# Altium integrated library crystal.IntLib: 105 symbols
Pins are listed as number, name and electrical type; pins without a type are passive.

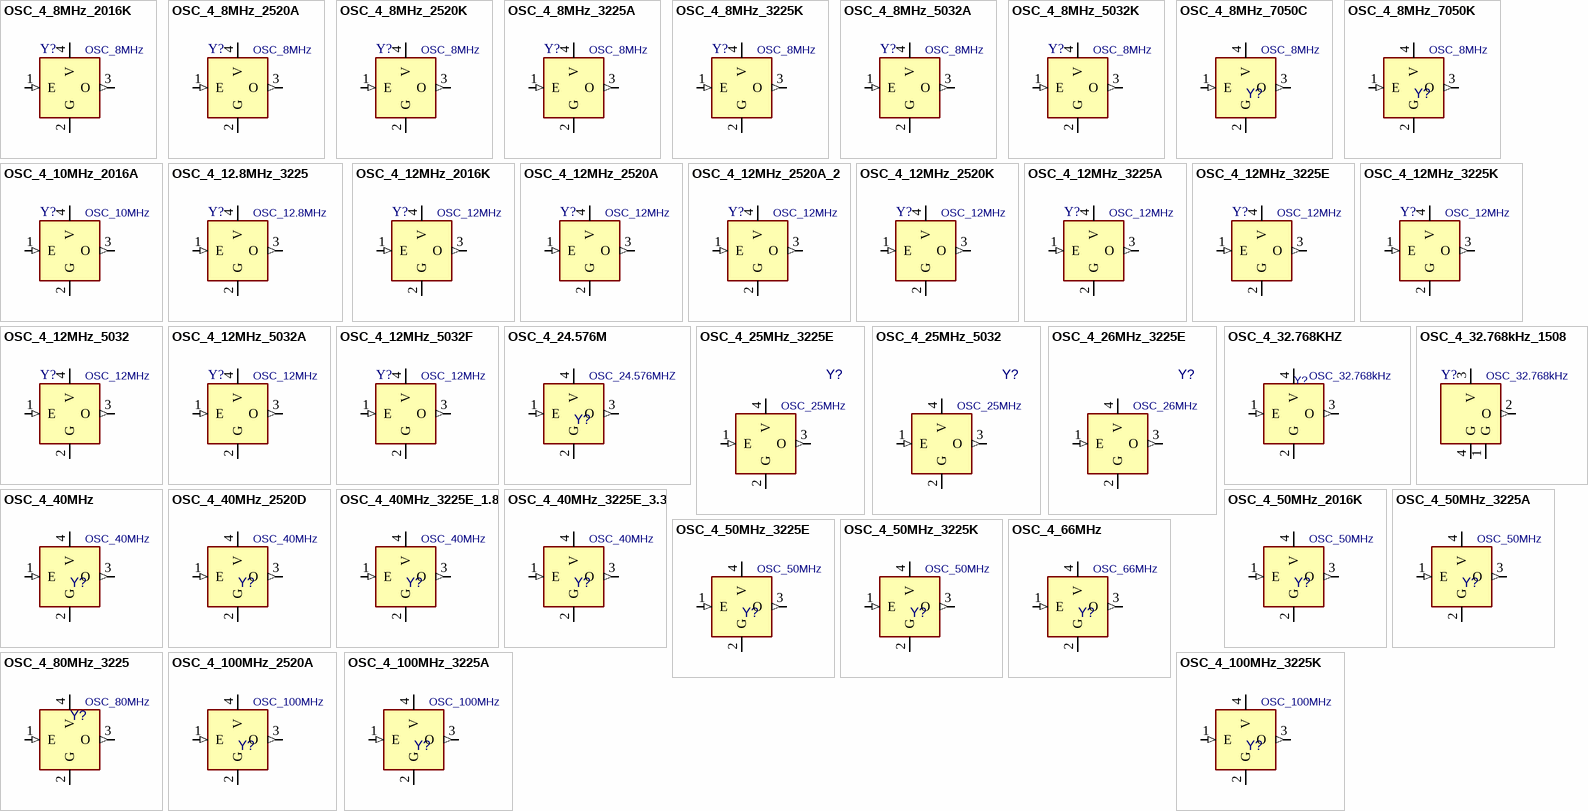
[diagram p0: symbols OSC_4_8MHz_2016K to OSC_4_100MHz_3225K]

## OSC_4_8MHz_2016K
designator Y?, comment OSC_8MHz
CLOCK OSCILLATOR,; MANF: AVX/Kyocera; PARAM: 50PPM, 15pF, -40~85oC; MANF_P#: KC2016K8.00000C1GE00; PARAM2: 1.8/2.5/3.3V; PRICE: 1.3$; VALUE: OSC_8MHz
footprint XTL_4_2016 (ABM11)
pins: 1 E (in), 2 G (power), 3 O (out), 4 V (power)

## OSC_4_8MHz_2520A
designator Y?, comment OSC_8MHz
CLOCK OSCILLATOR,; MANF: ABRACON; PARAM: 50PPM, 15pF, -40~85oC; MANF_P#: ASDMB-8.000MHZ-LC-T; PARAM2: 1.8~3.3V; PRICE: 1.2$; VALUE: OSC_8MHz
footprint XTL_4_2520 (CRYSTAL OSCILATOR 2.5X2.0mm, ABM10)
pins: 1 E (in), 2 G (power), 3 O (out), 4 V (power)

## OSC_4_8MHz_2520K
designator Y?, comment OSC_8MHz
CLOCK OSCILLATOR,; MANF: AVX/Kyocera; PARAM: 50PPM, 15pF, -40~85oC; MANF_P#: KC2520K8.00000C1GE00; PARAM2: 1.8/2.5/3.3V; PRICE: 1.3$; VALUE: OSC_8MHz
footprint XTL_4_2520 (CRYSTAL OSCILATOR 2.5X2.0mm, ABM10)
pins: 1 E (in), 2 G (power), 3 O (out), 4 V (power)

## OSC_4_8MHz_3225A
designator Y?, comment OSC_8MHz
CLOCK OSCILLATOR,; MANF: ABRACON; PARAM: 50PPM, 15pF, -40~85oC; MANF_P#: ASE-8.000MHZ-L-C-T; PARAM2: 3.3V; PRICE: 1.4$; VALUE: OSC_8MHz
footprint XTL_4_3225GEN (Footprint not found)
pins: 1 E (in), 2 G (power), 3 O (out), 4 V (power)

## OSC_4_8MHz_3225K
designator Y?, comment OSC_8MHz
CLOCK OSCILLATOR,; MANF: AVX/Kyocera; PARAM: 50PPM, 15pF, -40~85oC; MANF_P#: KC3225K8.00000C1GE00; PARAM2: 1.8/2.5/3.3V; PRICE: 1.3$; VALUE: OSC_8MHz
footprint XTL_4_3225GEN (Footprint not found)
pins: 1 E (in), 2 G (power), 3 O (out), 4 V (power)

## OSC_4_8MHz_5032A
designator Y?, comment OSC_8MHz
CLOCK OSCILLATOR, 8MHz; MANF: ABRACON; PARAM: 100PPM, 15pF, -40~85oC; MANF_P#: ASFL1-8.000MHZ-L-T; PARAM2: 3.3V; PRICE: 1.3$; VALUE: OSC_8MHz
footprint XTL_4_5032 (ASFLMB)
pins: 1 E (in), 2 G (power), 3 O (out), 4 V (power)

## OSC_4_8MHz_5032K
designator Y?, comment OSC_8MHz
CLOCK OSCILLATOR, 8MHz; MANF: AVX/Kyocera; PARAM: 50PPM, 15pF, -40~85oC; MANF_P#: KC5032K8.00000C1GE00; PARAM2: 1.8/2.5/3.3V; PRICE: 1.3$; VALUE: OSC_8MHz
footprint XTL_4_5032 (ASFLMB)
pins: 1 E (in), 2 G (power), 3 O (out), 4 V (power)

## OSC_4_8MHz_7050C
designator Y?, comment OSC_8MHz
CLOCK OSCILLATOR, 8MHz, 50PPM; MANF: CTS; PARAM: 50PPM, 50pF, -40~85oC; DESC: DESCRIPTION; DIST#: MOUSER; MANF_P#: CB3LV-3I-8M0000; PARAM2: 3.3V; ASSEMBLY: ASSEMBLY; PRICE: 1.3$; Value: OSC_8MHz
footprint XTL_4_7050GEN (2.5X2 TO 7X5)
pins: 1 E (in), 2 G (power), 3 O (out), 4 V (power)

## OSC_4_8MHz_7050K
designator Y?, comment OSC_8MHz
CLOCK OSCILLATOR, 8MHz, 50PPM; MANF: AVX/Kyocera; PARAM: 50PPM, 15pF, -40~85oC; DESC: DESCRIPTION; DIST#: MOUSER; MANF_P#: KC7050K8.00000C1GE00; PARAM2: 1.8/2.5/3.3V; ASSEMBLY: ASSEMBLY; PRICE: 1.3$; Value: OSC_8MHz
footprint XTL_4_7050GEN (2.5X2 TO 7X5)
pins: 1 E (in), 2 G (power), 3 O (out), 4 V (power)

## OSC_4_10MHz_2016A
designator Y?, comment OSC_10MHz
CLOCK OSCILLATOR, TCXO; MANF: Abracon; PARAM: TCXO ±2PPM, 15pF, -40~85°C; MANF_P#: ATXAIG-H13-F-10.000MHz-F25; PARAM2: 1.68~3.63V; PRICE: 3$; VALUE: OSC_10MHz
footprint XTL_4_2016 (ABM11)
pins: 1 E (in), 2 G (power), 3 O (out), 4 V (power)

## OSC_4_12.8MHz_3225
designator Y?, comment OSC_12.8MHz
CLOCK OSCILLATOR, TCXO; MANF: IQD; PARAM: TCXO ±0.28PPM, 10pF, -40~85°C; MANF_P#: LFTCXO075793; PARAM2: 3.3V; PRICE: 10$; VALUE: OSC_12.8MHz
footprint XTL_4_3225 (CRYSTAL OSCILATOR 3.2X2.5mm, ABM8, CDFN-4)
pins: 1 E (in), 2 G (power), 3 O (out), 4 V (power)

## OSC_4_12MHz_2016K
designator Y?, comment OSC_12MHz
CLOCK OSCILLATOR,; MANF: Kyocera; PARAM: 50PPM, 15pF, -40~85oC; MANF_P#: KC2016K12.0000C1GE00; PARAM2: 1.8~3.3V; PRICE: 1.3$; VALUE: OSC_12MHz
footprint XTL_4_2016 (ABM11)
pins: 1 E (in), 2 G (power), 3 O (out), 4 V (power)

## OSC_4_12MHz_2520A
designator Y?, comment OSC_12MHz
CLOCK OSCILLATOR,; MANF: ABRACON; PARAM: 50PPM, 15pF; MANF_P#: ASDMB-12.000MHZ-LC-T; PARAM2: 1.8~3.3V; PRICE: 1.2$; VALUE: OSC_12MHz
footprint XTL_4_2520 (CRYSTAL OSCILATOR 2.5X2.0mm, ABM10)
pins: 1 E (in), 2 G (power), 3 O (out), 4 V (power)

## OSC_4_12MHz_2520A_2
designator Y?, comment OSC_12MHz
CLOCK OSCILLATOR,; MANF: ABRACON; PARAM: 50PPM, 15pF; MANF_P#: ASDM1-12.000MHZ-LC-T; PARAM2: 3.3V; PRICE: 1.8$; VALUE: OSC_12MHz
footprint XTL_4_2520 (CRYSTAL OSCILATOR 2.5X2.0mm, ABM10)
pins: 1 E (in), 2 G (power), 3 O (out), 4 V (power)

## OSC_4_12MHz_2520K
designator Y?, comment OSC_12MHz
CLOCK OSCILLATOR,; MANF: Kyocera; PARAM: 50PPM, 15pF; DIST#: KC2520B12.0000C1GE00; MANF_P#: KC2520K12.0000C1GE00; PARAM2: 1.8~3.3V; PRICE: 1.3$; VALUE: OSC_12MHz
footprint XTL_4_2520 (CRYSTAL OSCILATOR 2.5X2.0mm, ABM10)
pins: 1 E (in), 2 G (power), 3 O (out), 4 V (power)

## OSC_4_12MHz_3225A
designator Y?, comment OSC_12MHz
CLOCK OSCILLATOR,; MANF: ABRACON; PARAM: 50PPM; DIST#: ASDMB-12.000MHZ-XY-T; MANF_P#: ASE-12.000MHZ-L-C-T; PARAM2: 3.3V; PRICE: 1.4$; VALUE: OSC_12MHz
footprint XTL_4_3225GEN (Footprint not found)
pins: 1 E (in), 2 G (power), 3 O (out), 4 V (power)

## OSC_4_12MHz_3225E
designator Y?, comment OSC_12MHz
CLOCK OSCILLATOR,; MANF: ECS; PARAM: 10PPM; MANF_P#: ECS-3225S33-120-FN-TR; PARAM2: 3.3V; PRICE: 1.2$; VALUE: OSC_12MHz
footprint XTL_4_3225GEN (Footprint not found)
pins: 1 E (in), 2 G (power), 3 O (out), 4 V (power)

## OSC_4_12MHz_3225K
designator Y?, comment OSC_12MHz
CLOCK OSCILLATOR,; MANF: Kyocera; PARAM: 50PPM, 15pF; MANF_P#: KC3225A30.0000C3GE00; PARAM2: 3.3V; PRICE: 1.5$; VALUE: OSC_12MHz
footprint XTL_4_3225GEN (Footprint not found)
pins: 1 E (in), 2 G (power), 3 O (out), 4 V (power)

## OSC_4_12MHz_5032
designator Y?, comment OSC_12MHz
CLOCK OSCILLATOR,; MANF: Microchip/Micrel; PARAM: 25PPM; MANF_P#: DSC1001BI2-012.0000T; VALUE: OSC_12MHz
footprint XTL_4_5032
pins: 1 E (in), 2 G (power), 3 O (out), 4 V (power)

## OSC_4_12MHz_5032A
designator Y?, comment OSC_12MHz
CLOCK OSCILLATOR,; MANF: ABRACON; PARAM: 25PPM; MANF_P#: ASFLMB-12.000MHZ-LC-T; VALUE: OSC_12MHz
footprint XTL_4_5032
pins: 1 E (in), 2 G (power), 3 O (out), 4 V (power)

## OSC_4_12MHz_5032F
designator Y?, comment OSC_12MHz
CLOCK OSCILLATOR,; MANF: FOX; PARAM: 25PPM; MANF_P#: FXO-HC536R-12.00000; VALUE: OSC_12MHz
footprint XTL_4_5032
pins: 1 E (in), 2 G (power), 3 O (out), 4 V (power)

## OSC_4_24.576M
designator Y?, comment OSC_24.576MHZ
CLOCK OSCILLATOR, 80MHz, 10PPM; MANF: ABRACON; DESC: DESCRIPTION; DIST#: MOUSER; MANF_P#: ASDMB-26.000MHZ-LY-T; ASSEMBLY: ASSEMBLY; PARAM: PARAM; PRICE: 1= 1.9$; PARAM2: 10PPM; Value: OSC_24.576MHZ
footprint XTL_4_2520 (CRYSTAL OSCILATOR 2.5X2.0mm)
pins: 1 E (in), 2 G (power), 3 O (out), 4 V (power)

## OSC_4_25MHz_3225E
designator Y?, comment OSC_25MHz
CLOCK OSCILLATOR, 25MHz, 10PPM, 3.2X2.5mm; MANF: ECS; PARAM: 10PPM, 15pF, -40~85oC; DESC: DESCRIPTION; DIST#: MOUSER; PARAM2: 1.8~3.3V; MANF_P#: ECS-3225S18-250-FN-TR; ASSEMBLY: ASSEMBLY; PRICE: 1= 1.2$; Value: OSC_25MHz
footprint XTL_4_3225GEN (CRYSTAL OSCILATOR 1.2X1.0mm to 3.2X2.5mm)
pins: 1 E (in), 2 G (power), 3 O (out), 4 V (power)

## OSC_4_25MHz_5032
designator Y?, comment OSC_25MHz
CLOCK OSCILLATOR, 25MHz, 10PPM, 3.5X2.5mm; MANF: ABRACON; PARAM: 10PPM, 15pF; DESC: DESCRIPTION; DIST#: MOUSER; PARAM2: 1.8V; MANF_P#: ASEMB-25.000MHZ-XY-T; ASSEMBLY: ASSEMBLY; PRICE: 1= 2.8$; Value: OSC_25MHz
footprint XTL_4_5032
pins: 1 E (in), 2 G (power), 3 O (out), 4 V (power)

## OSC_4_26MHz_3225E
designator Y?, comment OSC_26MHz
CLOCK OSCILLATOR, 26MHz, 10PPM, 3.2X2.5mm; MANF: ECS; PARAM: 10PPM, 15pF, -40~85oC; DESC: DESCRIPTION; DIST#: MOUSER; PARAM2: 1.8~3.3V; MANF_P#: ECS-3225S33-260-FN-TR; ASSEMBLY: ASSEMBLY; PRICE: 1= 1.2$; Value: OSC_26MHz
footprint XTL_4_3225GEN (CRYSTAL OSCILATOR 1.2X1.0mm to 3.2X2.5mm)
pins: 1 E (in), 2 G (power), 3 O (out), 4 V (power)

## OSC_4_32.768KHZ
designator Y?, comment OSC_32.768kHz
CLOCK OSCILLATOR, 32.768KHz, 2.5X2.0mm; MANF: AVX / Kyocera; MANF_P#: KC2520B32K7680CM2E00; VALUE: OSC_32.768kHz
footprint XTL_4_2520 (CRYSTAL OSCILATOR 2.5X2.0mm)
pins: 1 E (in), 2 G (power), 3 O (out), 4 V (power)

## OSC_4_32.768kHz_1508
designator Y?, comment OSC_32.768kHz
CLOCK OSCILLATOR; MANF: SiTime; PARAM: TCXO, ±5, -40~85°C; MANF_P#: SIT1552AI-JE-DCC-32.768E; PARAM2: 1.5~3.6Vcc; PRICE: 1.5$; VALUE: OSC_32.768kHz
footprint XTL_4_BGA1508 (BGA-4, 1.5x0.8x0.5mm)
pins: 1 G, 2 O (out), 3 V, 4 G

## OSC_4_40MHz
designator Y?, comment OSC_40MHz
CLOCK OSCILLATOR, 40MHz, 20PPM; MANF: IDT, ABRACON; PARAM: 25PPM, 20PPM; DESC: DESCRIPTION; DIST#: MOUSER; MANF_P#: XLH536040.000JS4I8, ASV-40.000MHZ-E-T; PARAM2: 3.3V; ASSEMBLY: ASSEMBLY; PRICE: 1.3$; Value: OSC_40MHz
footprint XTL_4_7050GEN (2.5X2 TO 7X5)
pins: 1 E (in), 2 G (power), 3 O (out), 4 V (power)

## OSC_4_40MHz_2520D
designator Y?, comment OSC_40MHz
CLOCK OSCILLATOR, 40MHz, 10PPM; MANF: Microchip; PARAM: 10PPM, -40~105oC; DESC: DESCRIPTION; DIST#: MOUSER; MANF_P#: DSC1001DL5-040.0000; PARAM2: 1.8~3.3V; ASSEMBLY: ASSEMBLY; PRICE: 1.9$; Value: OSC_40MHz
footprint XTL_4_3225GEN (Footprint not found)
pins: 1 E (in), 2 G (power), 3 O (out), 4 V (power)

## OSC_4_40MHz_3225E_1.8
designator Y?, comment OSC_40MHz
CLOCK OSCILLATOR, 40MHz, 10PPM; MANF: ECS; PARAM: 10PPM, -40~85oC; DESC: DESCRIPTION; DIST#: MOUSER; MANF_P#: ECS-3225S18-400-FN; PARAM2: 1.8V; ASSEMBLY: ASSEMBLY; PRICE: 1.3$; Value: OSC_40MHz
footprint XTL_4_3225S (CRYSTAL OSCILATOR 3.2X2.5mm, small pad)
pins: 1 E (in), 2 G (power), 3 O (out), 4 V (power)

## OSC_4_40MHz_3225E_3.3
designator Y?, comment OSC_40MHz
CLOCK OSCILLATOR, 40MHz, 10PPM; MANF: ECS; PARAM: 10PPM, -40~85oC; DESC: DESCRIPTION; DIST#: MOUSER; MANF_P#: ECS-3225S33-400-FN; PARAM2: 3.3V; ASSEMBLY: ASSEMBLY; PRICE: 1.3$; Value: OSC_40MHz
footprint XTL_4_3225S (CRYSTAL OSCILATOR 3.2X2.5mm, small pad)
pins: 1 E (in), 2 G (power), 3 O (out), 4 V (power)

## OSC_4_50MHz_2016K
designator Y?, comment OSC_50MHz
CLOCK OSCILLATOR, 50MHz, 50PPM; MANF: AVX/Kyocera; DESC: DESCRIPTION; DIST#: MOUSER; MANF_P#: MC2016K50.0000C16ESH; PARAM2: 1.6~3.6V, -40~105oC; ASSEMBLY: ASSEMBLY; PARAM: 50PPM; PRICE: 2.4$; Value: OSC_50MHz
footprint XTL_4_3225GEN (CRYSTAL OSCILATOR 1.2X1.0mm to 3.2X2.5mm)
pins: 1 E (in), 2 G (power), 3 O (out), 4 V (power)

## OSC_4_50MHz_3225A
designator Y?, comment OSC_50MHz
CLOCK OSCILLATOR, 50MHz, 50PPM, 3225; MANF: ABRACON; DESC: DESCRIPTION; DIST#: MOUSER; MANF_P#: ASE-50.000MHZ-L-C-T; PARAM2: 3.3V, -40~85oC; ASSEMBLY: ASSEMBLY; PARAM: 50PPM; PRICE: 1.5$; Value: OSC_50MHz
footprint XTL_4_3225GEN (CRYSTAL OSCILATOR 1.2X1.0mm to 3.2X2.5mm)
pins: 1 E (in), 2 G (power), 3 O (out), 4 V (power)

## OSC_4_50MHz_3225E
designator Y?, comment OSC_50MHz
CLOCK OSCILLATOR, 50MHz, 10PPM, 3225; MANF: ECS; DESC: DESCRIPTION; DIST#: MOUSER; MANF_P#: ECS-3225S33-500-FN-TR; PARAM2: 1.8~3.3V, -40~85oC; ASSEMBLY: ASSEMBLY; PARAM: 10PPM; PRICE: 1.2$; Value: OSC_50MHz
footprint XTL_4_3225GEN (CRYSTAL OSCILATOR 1.2X1.0mm to 3.2X2.5mm)
pins: 1 E (in), 2 G (power), 3 O (out), 4 V (power)

## OSC_4_50MHz_3225K
designator Y?, comment OSC_50MHz
CLOCK OSCILLATOR, 50MHz, 50PPM, 3225; MANF: AVX/Kyocera; DESC: DESCRIPTION; DIST#: MOUSER; MANF_P#: KC3225A50.0000C30E00; PARAM2: 3.3V, -10~70oC; ASSEMBLY: ASSEMBLY; PARAM: 50PPM; PRICE: 1.5$; Value: OSC_50MHz
footprint XTL_4_3225GEN (CRYSTAL OSCILATOR 1.2X1.0mm to 3.2X2.5mm)
pins: 1 E (in), 2 G (power), 3 O (out), 4 V (power)

## OSC_4_66MHz
designator Y?, comment OSC_66MHz
CLOCK OSCILLATOR, 80MHz, 10PPM; MANF: ABRACON; DESC: DESCRIPTION; DIST#: MOUSER; MANF_P#: ASFLMB-66.6666MHZ-XY-T; ASSEMBLY: ASSEMBLY; PARAM: PARAM; PRICE: 1= 2.1$; PARAM2: 10PPM; Value: OSC_66MHz
footprint XTL_4_7050GEN (2.5X2 TO 7X5)
pins: 1 E (in), 2 G (power), 3 O (out), 4 V (power)

## OSC_4_80MHz_3225
designator Y?, comment OSC_80MHz
CLOCK OSCILLATOR, 80MHz, 10PPM; MANF: ABRACON; DESC: DESCRIPTION; MANF_P#: ASEMB-80.000MHZ-LY-T; ASSEMBLY: ASSEMBLY; PARAM: PARAM; PRICE: PRICE; Value: OSC_80MHz
footprint XTL_4_3225 (CRYSTAL OSCILATOR 3.2X2.5mm)
pins: 1 E (in), 2 G (power), 3 O (out), 4 V (power)

## OSC_4_100MHz_2520A
designator Y?, comment OSC_100MHz
CLOCK OSCILLATOR, 100MHz, 20PPM; MANF: ABRACON; PARAM: 20PPM, -40~85oC; DESC: DESCRIPTION; DIST#: MOUSER; MANF_P#: ASTMHTD-100.000MHZ-AJ-E; PARAM2: 2.2~3.6V; ASSEMBLY: ASSEMBLY; PRICE: 3$; Value: OSC_100MHz
footprint XTL_4_2520 (CRYSTAL OSCILATOR 2.5X2.0mm, ABM10)
pins: 1 E (in), 2 G (power), 3 O (out), 4 V (power)

## OSC_4_100MHz_3225A
designator Y?, comment OSC_100MHz
CLOCK OSCILLATOR, 100MHz, 20PPM; MANF: ABRACON; PARAM: 20PPM, -40~85oC; DESC: DESCRIPTION; DIST#: MOUSER; MANF_P#: ASTMHTE-100.000MHZ-AJ-E; PARAM2: 2.2~3.6V; ASSEMBLY: ASSEMBLY; PRICE: 3$; Value: OSC_100MHz
footprint XTL_4_3225GEN (CRYSTAL OSCILATOR 1.2X1.0mm to 3.2X2.5mm)
pins: 1 E (in), 2 G (power), 3 O (out), 4 V (power)

## OSC_4_100MHz_3225K
designator Y?, comment OSC_100MHz
CLOCK OSCILLATOR, 100MHz, 50PPM; MANF: Kyocera; PARAM: 50PPM, -40~85oC; DESC: DESCRIPTION; DIST#: MOUSER; MANF_P#: KC3225A100.000C3GE00; PARAM2: 3.3V; ASSEMBLY: ASSEMBLY; PRICE: 2.2$; Value: OSC_100MHz
footprint XTL_4_3225GEN (CRYSTAL OSCILATOR 1.2X1.0mm to 3.2X2.5mm)
pins: 1 E (in), 2 G (power), 3 O (out), 4 V (power)

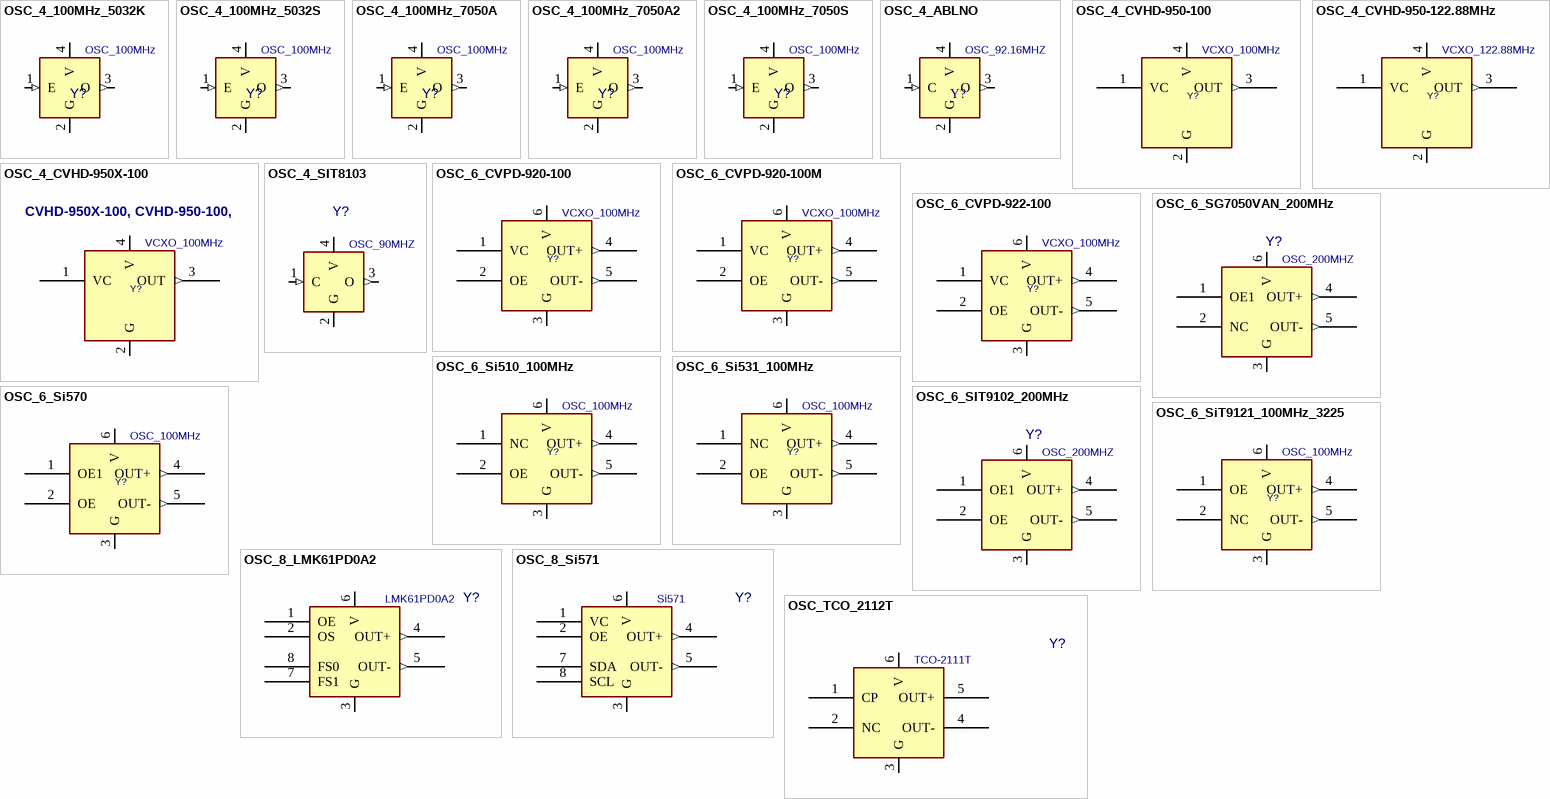
[diagram p1: symbols OSC_4_100MHz_5032K to OSC_TCO_2112T]

## OSC_4_100MHz_5032K
designator Y?, comment OSC_100MHz
CLOCK OSCILLATOR, 100MHz, 50PPM; MANF: Kyocera; PARAM: 50PPM, -40~85oC; DESC: DESCRIPTION; DIST#: MOUSER; MANF_P#: KC5032A100.000C1GE00; PARAM2: 1.6~3.6V; ASSEMBLY: ASSEMBLY; PRICE: 1.8$; Value: OSC_100MHz
footprint XTL_4_5032 (ASFLMB)
pins: 1 E (in), 2 G (power), 3 O (out), 4 V (power)

## OSC_4_100MHz_5032S
designator Y?, comment OSC_100MHz
CLOCK OSCILLATOR, 100MHz, 50PPM; MANF: Silicon Labs; PARAM: 50PPM, Si510, -40~85oC; DESC: DESCRIPTION; DIST#: MOUSER; MANF_P#: 510KBA100M000BAG; PARAM2: 1.8V; ASSEMBLY: ASSEMBLY; PRICE: 4.4$; Value: OSC_100MHz
footprint XTL_4_5032 (ASFLMB)
pins: 1 E (in), 2 G (power), 3 O (out), 4 V (power)

## OSC_4_100MHz_7050A
designator Y?, comment OSC_100MHz
CLOCK OSCILLATOR, 100MHz, 10PPM; MANF: ABRACON; PARAM: 10PPM, 0~70oC; DESC: DESCRIPTION; DIST#: MOUSER; MANF_P#: ASFLMB-100.000MHZ-XY-T; PARAM2: 1.7~3.6V; ASSEMBLY: ASSEMBLY; PRICE: 2.3$; Value: OSC_100MHz
footprint XTL_4_7050GEN (2.5X2 TO 7X5)
pins: 1 E (in), 2 G (power), 3 O (out), 4 V (power)

## OSC_4_100MHz_7050A2
designator Y?, comment OSC_100MHz
CLOCK OSCILLATOR, 100MHz, 10PPM; MANF: ABRACON; PARAM: 10PPM, 0~70oC; DESC: DESCRIPTION; DIST#: MOUSER; MANF_P#: ASVMB-100.000MHZ-LY-T; PARAM2: 1.7~3.6V; ASSEMBLY: ASSEMBLY; PRICE: 2.3$; Value: OSC_100MHz
footprint XTL_4_7050GEN (2.5X2 TO 7X5)
pins: 1 E (in), 2 G (power), 3 O (out), 4 V (power)

## OSC_4_100MHz_7050S
designator Y?, comment OSC_100MHz
CLOCK OSCILLATOR, 100MHz, 50PPM; MANF: Silicon Labs; PARAM: 50PPM, -40~85oC; DESC: DESCRIPTION; DIST#: MOUSER; MANF_P#: 510BBA100M000AAGR; PARAM2: 3.3V; ASSEMBLY: ASSEMBLY; PRICE: 5$; Value: OSC_100MHz
footprint XTL_4_7050GEN (2.5X2 TO 7X5)
pins: 1 E (in), 2 G (power), 3 O (out), 4 V (power)

## OSC_4_ABLNO
designator Y?, comment OSC_92.16MHZ
OSCILLATOR, 80MHz; MANF_P#: ABLNO-V-92.16MHZ; Value: OSC_92.16MHZ
footprint ABLNO (Footprint not found)
pins: 1 C (in), 2 G (power), 3 O (out), 4 V (power)

## OSC_4_CVHD-950-100
designator Y?, comment VCXO_100MHz
CLOCK OSCILLATOR,; MANF: CRYSTEK; MANF_P#: CVHD-950-100; PARAM2: 3.3V; PARAM: 20 PPM; VALUE: VCXO_100MHz
footprint XTL_4_9X14 (VCXO CVHD-950 9x14mm)
pins: 1 VC, 2 G (power), 3 OUT (out), 4 V (power)

## OSC_4_CVHD-950-122.88MHz
designator Y?, comment VCXO_122.88MHz
CLOCK OSCILLATOR,; MANF: CRYSTEK; MANF_P#: CVHD-950X-122.88M; PARAM2: 3.3V; PARAM: 20 PPM; VALUE: VCXO_122.88MHz
footprint XTL_4_9X14 (VCXO CVHD-950 9x14mm)
pins: 1 VC, 2 G (power), 3 OUT (out), 4 V (power)

## OSC_4_CVHD-950X-100
designator Y?, comment VCXO_100MHz
CLOCK OSCILLATOR,; MANF: CRYSTEK; MANF_P#: CVHD-950X-100; PARAM2: 3.3V; PARAM: 20 PPM; VALUE: VCXO_100MHz
footprint XTL_4_9X14 (VCXO CVHD-950 9x14mm)
pins: 1 VC, 2 G (power), 3 OUT (out), 4 V (power)
text: CVHD-950X-100, CVHD-950-100,

## OSC_4_SIT8103
designator Y?, comment OSC_90MHZ
OSCILLATOR 90.00000MHZ 3.3V; MANF: SiTime; DESC: DESCRIPTION; DIST#: MOUSER; MANF_P#: SIT8103AC-23-33E-90.0000Y; PARAM2: 50PPM; ASSEMBLY: ASSEMBLY; PARAM: PARAM; PRICE: PRICE; VALUE: OSC_90MHZ
footprint XTL_4_7050GEN (2.5X2 TO 7X5)
pins: 1 C (in), 2 G (power), 3 O (out), 4 V (power)

## OSC_6_CVPD-920-100
designator Y?, comment VCXO_100MHz
CLOCK OSCILLATOR,; MANF: CRYSTEK; MANF_P#: CVPD-920-100.000; PARAM2: 3.3V; PARAM: 20 PPM; VALUE: VCXO_100MHz
footprint XTL_6_9X14 (VCXO CVPD-920/940/970 9x14mm)
pins: 1 VC, 2 OE, 3 G (power), 4 OUT+ (out), 5 OUT- (out), 6 V (power)

## OSC_6_CVPD-920-100M
designator Y?, comment VCXO_100MHz
CLOCK OSCILLATOR,; MANF: CRYSTEK; MANF_P#: CVPD-920X-100; PARAM2: 3.3V; PARAM: 20 PPM; VALUE: VCXO_100MHz
footprint XTL_6_9X14 (VCXO CVPD-920/940/970 9x14mm)
pins: 1 VC, 2 OE, 3 G (power), 4 OUT+ (out), 5 OUT- (out), 6 V (power)

## OSC_6_CVPD-922-100
designator Y?, comment VCXO_100MHz
CLOCK OSCILLATOR,; MANF: CRYSTEK; MANF_P#: CVPD-922-100.000; PARAM2: 3.3V; PARAM: 20 PPM; VALUE: VCXO_100MHz
footprint XTL_6_9X14 (VCXO CVPD-920/940/970 9x14mm)
pins: 1 VC, 2 OE, 3 G (power), 4 OUT+ (out), 5 OUT- (out), 6 V (power)

## OSC_6_SG7050VAN_200MHz
designator Y?, comment OSC_200MHZ
CLOCK OSCILLATOR, DIFFERENTIAL, 200MHZ; MANF: Epson; PARAM: 30ppm; DESC: DESCRIPTION; MANF_P#: SG7050VAN 200.000000M-KEGA3; PARAM2: 2.5~3.3VCC; ASSEMBLY: ASSEMBLY; PRICE: 2$; VALUE: OSC_200MHZ
footprint XTL_6_7050 (Crystal Oscillator 6-Lead, 7X5mm)
pins: 1 OE1, 2 NC, 3 G (power), 4 OUT+ (out), 5 OUT- (out), 6 V (power)

## OSC_6_Si510_100MHz
designator Y?, comment OSC_100MHz
OSCILLATOR, DIFFERENTIAL LVDS, 100MHZ; MANF: Silicon Labs; MANF_P#: 510BBA100M000AAGR; PARAM2: 3.3V; PARAM: 50PPM, -40~85oC; PRICE: 6$; VALUE: OSC_100MHz
footprint XTL_6_7050 (Crystal Oscillator 6-Lead, 7X5mm)
pins: 1 NC, 2 OE, 3 G (power), 4 OUT+ (out), 5 OUT- (out), 6 V (power)

## OSC_6_Si531_100MHz
designator Y?, comment OSC_100MHz
OSCILLATOR, DIFFERENTIAL LVDS, 100MHZ; MANF: Silicon Labs; MANF_P#: 531BB100M000DG; PARAM2: 3.3V; PARAM: 31.5PPM, -40~85oC; PRICE: 6$; VALUE: OSC_100MHz
footprint XTL_6_7050 (Crystal Oscillator 6-Lead, 7X5mm)
pins: 1 NC, 2 OE, 3 G (power), 4 OUT+ (out), 5 OUT- (out), 6 V (power)

## OSC_6_Si570
designator Y?, comment OSC_100MHz
CLOCK OSCILLATOR,; MANF: CRYSTEK; MANF_P#: CCLD-033-50-100.000; VALUE: OSC_100MHz
footprint XTL_6_7050 (Crystal Oscillator 6-Lead, 7X5mm)
pins: 1 OE1, 2 OE, 3 G (power), 4 OUT+ (out), 5 OUT- (out), 6 V (power)

## OSC_6_SIT9102_200MHz
designator Y?, comment OSC_200MHZ
CLOCK OSCILLATOR, DIFFERENTIAL, 200MHZ; MANF: SiTime; DESC: DESCRIPTION; MANF_P#: SIT9102AI-243N25E200.0000; PARAM2: 50PPM; ASSEMBLY: ASSEMBLY; PARAM: PARAM; PRICE: PRICE; VALUE: OSC_200MHZ
footprint XTL_6_7050 (Crystal Oscillator 6-Lead, 7X5mm)
pins: 1 OE1, 2 OE, 3 G (power), 4 OUT+ (out), 5 OUT- (out), 6 V (power)

## OSC_6_SiT9121_100MHz_3225
designator Y?, comment OSC_100MHz
OSCILLATOR, DIFFERENTIAL LVDS, 100MHZ; MANF: SiTime; MANF_P#: SiT9121AI-2BF-33E100.000000; PARAM2: 3.3V, LVDS; PARAM: 10PPM, -40~85oC; PRICE: 6$; VALUE: OSC_100MHz
footprint XTL_6_3225SIT (CRYSTAL OSCILATOR 5X3.2mm SIT)
pins: 1 OE, 2 NC, 3 G (power), 4 OUT+ (out), 5 OUT- (out), 6 V (power)

## OSC_8_LMK61PD0A2
designator Y?, comment LMK61PD0A2
CLOCK OSCILLATOR, Pin Selectable; MANF: TI; PARAM: 62.5/100/106.25/125/156.25/212.5/312.5MHz; DESC: DESCRIPTION; MANF_P#: LMK61PD0A2-SIA; PARAM2: 3.3V, LVDS/LVPECL/HCSL; ASSEMBLY: ASSEMBLY; PRICE: 15$; Value: LMK61PD0A2
footprint XTL_8_7050 (CRYSTAL OSCILLATOR 7X5mm)
pins: 1 OE, 2 OS, 3 G (power), 4 OUT+ (out), 5 OUT- (out), 6 V (power), 7 FS1, 8 FS0

## OSC_8_Si571
designator Y?, comment Si571
CLOCK OSCILLATOR, VCXO; MANF: Silicon Labs; DESC: DESCRIPTION; ASSEMBLY: ASSEMBLY; PARAM: PARAM; PRICE: PRICE; MANF_P#: Si571; Value: Si571
footprint XTL_8_7050 (CRYSTAL OSCILLATOR 7X5mm)
pins: 1 VC, 2 OE, 3 G (power), 4 OUT+ (out), 5 OUT- (out), 6 V (power), 7 SDA, 8 SCL

## OSC_TCO_2112T
designator Y?, comment TCO-2111T
CLOCK OSCILLATOR, VCXO, 245.76; MANF: EPSON; DESC: DESCRIPTION; MANF_P#: TCO-2111T 491.5200MHZ; ASSEMBLY: ASSEMBLY; PARAM: PARAM; PRICE: PRICE; Value: TCO-2111T
footprint EDSO254_6_1400X900 (TCO-2110 SERIES)
pins: 1 CP, 2 NC, 3 G (power), 4 OUT-, 5 OUT+, 6 V (power)


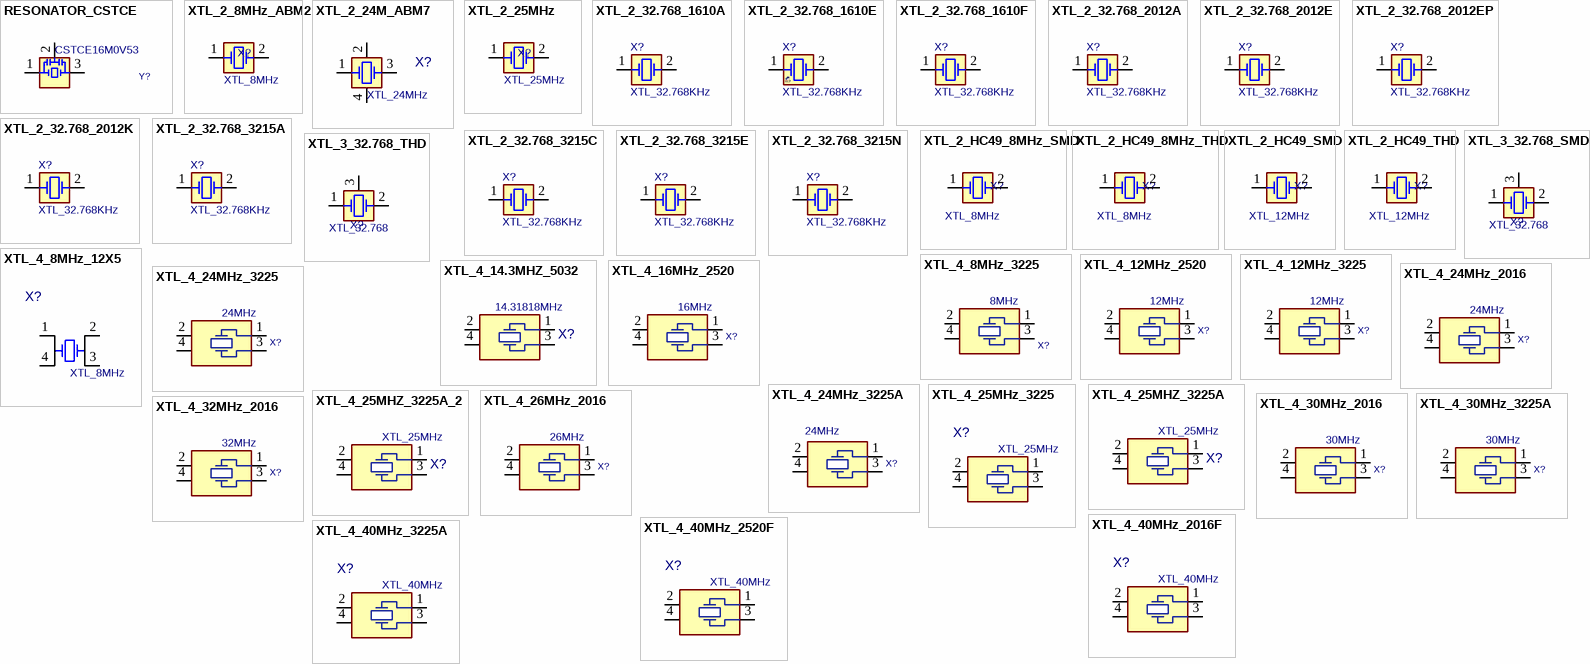
[diagram p2: symbols RESONATOR_CSTCE to XTL_4_40MHz_3225A]

## RESONATOR_CSTCE
designator Y?, comment CSTCE16M0V53
MANF: MURATA; MANF_P#: CSTCE16M0V53-R0; VALUE: CSTCE16M0V53
footprint XTL_3_3213 (Crystal resonator CSTCE 3-lead 3.2 mm x 1.3 mm)
pins: 1 OSC1, 2, 3 OSC2

## XTL_2_8MHz_ABM2
designator X?, comment XTL_8MHz
Crystal 2; MANF: ABRACON; PARAM: 30PPM; PARAM2: 18PF; MANF_P#: ABM2-8.000MHZ-D4Y-T; ASSEMBLY: ASSEMBLY; PRICE: 0.73$; Value: XTL_8MHz
footprint XTL_2_8045 (ABM2 8.0X4.5x1.4mm)
simulation model XTAL (Spice Subcircuit)
pins: 1 OSC1, 2 OSC2

## XTL_2_24M_ABM7
designator X?, comment XTL_24MHz
CRYSTAL,; MANF: ABRACON; PARAM: 50PPM; DESC: DESCRIPTION; DIST#: MOUSER; MANF_P#: ABM7-24.000MHZ-D-2-Y-T; ASSEMBLY: ASSEMBLY; PRICE: PRICE; VALUE: XTL_24MHz
footprint XTL_2_6035 (ABM7 6.2X3.5mm, 6.0X3.5mm)
pins: 1, 2 GND2, 3 2, 4 GND4

## XTL_2_25MHz
designator X?, comment XTL_25MHz
Crystal 2 5X3.2mm; MANF_PART#2: ABM3C-25.000MHZ-D4Y-T; MANF_PART#3: 445I23D25M00000; DIST#: 815-ABM3-25-B2-T; DESC: CLOCK, CRYSTAL, 25MHz; MANF: ABRACON; PARAM: 20PPM; PARAM2: 18PF; MANF_P#: ABM3-25.000MHZ-B2-T; ASSEMBLY: ASSEMBLY; PRICE: *; Value: XTL_25MHz
footprint XTL_2_5032 (ABM3)
simulation model XTAL (Spice Subcircuit)
pins: 1 OSC1, 2 OSC2

## XTL_2_32.768_1610A
designator X?, comment XTL_32.768KHz
Crystal, 32.768KHz, 9pF, 20PPM; MANF: ABRACON; MANF_P#: ABS05-32.768KHZ-9-T; PARAM: -40~85oC; PARAM2: 9pF, 20PPM; PRICE: 0.8$; VALUE: XTL_32.768KHz
footprint XTL_2_1610 (Crystals 1.6 mm x 1.0 mm)
pins: 1 OSC1, 2 OSC2

## XTL_2_32.768_1610E
designator X?, comment XTL_32.768KHz
Crystal, 32.768KHz, 12pF, 20PPM; MANF: ECS; MANF_P#: ECS-.327-12.5-16-TR; PARAM: -40~85oC; PARAM2: 12pF, 20PPM; PRICE: 0.9$; VALUE: XTL_32.768KHz
footprint XTL_2_1610 (Crystals 1.6 mm x 1.0 mm)
pins: 1 OSC1, 2 OSC2

## XTL_2_32.768_1610F
designator X?, comment XTL_32.768KHz
Crystal, 32.768KHz, 12pF, 20PPM; MANF: FOX; MANF_P#: FK161EIHM0.032768; PARAM: -40~85oC; PARAM2: 12pF, 20PPM; PRICE: 1$; VALUE: XTL_32.768KHz
footprint XTL_2_1610 (Crystals 1.6 mm x 1.0 mm)
pins: 1 OSC1, 2 OSC2

## XTL_2_32.768_2012A
designator X?, comment XTL_32.768KHz
Crystal, 32.768KHz, 3pF, 20PPM; MANF: ABRACON; MANF_P#: ABS06-32.768KHz-1-T; PARAM: -40~85oC; PARAM2: 3pF, 20PPM; PRICE: 0.8$; VALUE: XTL_32.768KHz
footprint XTL_2_2012 (ABS06 2.0X1.2mm)
pins: 1 OSC1, 2 OSC2

## XTL_2_32.768_2012E
designator X?, comment XTL_32.768KHz
Crystal, 32.768KHz, 6pF, 20PPM; MANF: ECS; MANF_P#: ECS-.327-6-12-TR; PARAM: -40~85oC; PARAM2: 6pF, 20PPM; PRICE: 0.8$; VALUE: XTL_32.768KHz
footprint XTL_2_2012 (ABS06 2.0X1.2mm)
pins: 1 OSC1, 2 OSC2

## XTL_2_32.768_2012EP
designator X?, comment XTL_32.768KHz
Crystal, 32.768KHz, 12pF, 20PPM; MANF: EPSON; MANF_P#: FC-12M 32.7680KA-A3; PARAM: -40~85oC; PARAM2: 12pF, 20PPM; PRICE: 0.8$; VALUE: XTL_32.768KHz
footprint XTL_2_2012 (ABS06 2.0X1.2mm)
pins: 1 OSC1, 2 OSC2

## XTL_2_32.768_2012K
designator X?, comment XTL_32.768KHz
Crystal, 32.768KHz, 9pF, 20PPM; MANF: AVX/Kyocera; MANF_P#: ST2012SB32768E0HPWBB; PARAM: -40~85oC; PARAM2: 9pF, 20PPM; PRICE: 0.7$; VALUE: XTL_32.768KHz
footprint XTL_2_2012 (ABS06 2.0X1.2mm)
pins: 1 OSC1, 2 OSC2

## XTL_2_32.768_3215A
designator X?, comment XTL_32.768KHz
Crystal, 32.768KHz, 3pF, 20PPM; MANF: ABRACON; MANF_P#: ABS07W-32.768kHz-D-2-T; PARAM: -40~85oC; PARAM2: 3pF, 20PPM; PRICE: 1$; VALUE: XTL_32.768KHz
footprint XTL_2_3215 (ABS07 3.2x1.5mm)
pins: 1 OSC1, 2 OSC2

## XTL_2_32.768_3215C
designator X?, comment XTL_32.768KHz
Crystal, 32.768KHz, 5pF, 20PPM; MANF: CTS; MANF_P#: TFE322T32K7680R; PARAM: -40~85oC; PARAM2: 5pF, 20PPM; PRICE: 0.9$; VALUE: XTL_32.768KHz
footprint XTL_2_3215 (ABS07 3.2x1.5mm)
pins: 1 OSC1, 2 OSC2

## XTL_2_32.768_3215E
designator X?, comment XTL_32.768KHz
Crystal, 32.768KHz, 6pF, 20PPM; MANF: ECS; MANF_P#: ECS-.327-CDX-1128; PARAM: -40~85oC; PARAM2: 6pF, 20PPM; PRICE: 0.6$; VALUE: XTL_32.768KHz
footprint XTL_2_3215 (ABS07 3.2x1.5mm)
pins: 1 OSC1, 2 OSC2

## XTL_2_32.768_3215N
designator X?, comment XTL_32.768KHz
Crystal, 32.768KHz, 6pF, 20PPM; MANF: NDK; MANF_P#: NX3215SA-32.768KHZ; PARAM2: 6/9/12pF, 20PPM; PARAM: -40~125oC; PRICE: 0.6$; VALUE: XTL_32.768KHz
footprint XTL_2_3215 (ABS07 3.2x1.5mm)
pins: 1 OSC1, 2 OSC2

## XTL_2_HC49_8MHz_SMD
designator X?, comment XTL_8MHz
Crystal MOST POPULAR ABL HC49 PACKAGE; MANF: ABRACON; MANF_P#: ABLS-8.000MHZ-B4-T; PARAM: 8MHz, 18pF, 30PPM, -20~70oC; PRICE: 0.3$; VALUE: XTL_8MHz
footprint XTL_2_11X5 (SMD crystal resonator, ABL, ABLS, HC-49, HC49 11X4.5MM)
pins: 1 OSC1, 2 OSC2

## XTL_2_HC49_8MHz_THD
designator X?, comment XTL_8MHz
Crystal MOST POPULAR ABL HC49 PACKAGE; MANF: ABRACON; MANF_P#: ABLS-8.000MHZ-B4-T; PARAM: 8MHz, 18pF, 30PPM, -20~70oC; PRICE: 0.3$; VALUE: XTL_8MHz
footprint XTLT_2 (Crystal PTH HC49S)
pins: 1 OSC1, 2 OSC2

## XTL_2_HC49_SMD
designator X?, comment XTL_12MHz
Crystal MOST POPULAR ABL HC49 PACKAGE; VALUE: XTL_12MHz
footprint XTL_2_11X5 (SMD crystal resonator, ABL, ABLS, HC-49, HC49 11X4.5MM)
pins: 1 OSC1, 2 OSC2

## XTL_2_HC49_THD
designator X?, comment XTL_12MHz
Crystal MOST POPULAR ABL HC49 PACKAGE; VALUE: XTL_12MHz
footprint XTLT_2 (Crystal PTH HC49S)
pins: 1 OSC1, 2 OSC2

## XTL_3_32.768_SMD
designator X?, comment XTL_32.768
Crystal MOST POPULAR PACKAGE; MANF: ABRACON; MANF_P#: AB26T-32.768KHZ; PARAM2: 12pF; PARAM: 20PPM, -40~85°C; VALUE: XTL_32.768
footprint XTL_RTC
pins: 1 OSC1, 2 OSC2, 3 CASE

## XTL_3_32.768_THD
designator X?, comment XTL_32.768
Crystal MOST POPULAR PACKAGE; MANF: ABRACON; MANF_P#: AB26T-32.768KHZ; PARAM2: 12pF; PARAM: 20PPM, -40~85°C; VALUE: XTL_32.768
footprint XTLT_RTC (CRYSTAL RTC SLEEP)
pins: 1 OSC1, 2 OSC2, 3 CASE

## XTL_4_8MHz_12X5
designator X?, comment XTL_8MHz
CRYSTAL 8 MHZ 7pF, 10PPM; MANF: ECS; PARAM: 30PPM, -40~85oC; DIST#: MOUSER; PARAM2: 18pF; MANF_P#: ECS-80-18-18-TR; ASSEMBLY: ASSEMBLY; PRICE: 1.7$; VALUE: XTL_8MHz
footprint XTL_4_12X5 (ABC2, SMD crystal, 11.8X5.5mm)
pins: 1, 2, 3, 4

## XTL_4_8MHz_3225
designator X?, comment 8MHz
Crystal 8MHz; MANF: ECS; MANF_P#: ECS-80-18-33-JGN-TR; PARAM: 30PPM, 20pF; PRICE: 0.5$; VALUE: 8MHz
footprint XTL_4_3225 (CRYSTAL OSCILATOR 3.2X2.5mm)
pins: 1, 2, 3 2, 4

## XTL_4_12MHz_2520
designator X?, comment 12MHz
Crystal 12MHz; MANF: JWT; MANF_P#: CM4012M00020T5074172; PARAM: ±30PPM, 20pF; PRICE: 0.05$; VALUE: 12MHz
footprint XTL_4_2520 (CRYSTAL OSCILATOR 2.5X2.0mm, ABM10, CDFN-4, ASDM)
pins: 1, 2, 3 2, 4

## XTL_4_12MHz_3225
designator X?, comment 12MHz
Crystal 12MHz; MANF: ECS; MANF_P#: ECS-120-18-33-JEM-TR; PARAM: 20PPM, 18pF; PRICE: 0.5$; VALUE: 12MHz
footprint XTL_4_3225 (CRYSTAL OSCILATOR 3.2X2.5mm)
pins: 1, 2, 3 2, 4

## XTL_4_14.3MHZ_5032
designator X?, comment 14.31818MHz
MANF: ABRACON; DESC: DESCRIPTION; DIST#: MOUSER; MANF_P#: ABM3B-14.31818MHZ-10-1-U-T; ASSEMBLY: ASSEMBLY; PARAM: PARAM; PRICE: PRICE; VALUE: 14.31818MHz
footprint XTL_4_5032
pins: 1, 2, 3 2, 4

## XTL_4_16MHz_2520
designator X?, comment 16MHz
Crystal 16MHz; MANF: ABRACON; MANF_P#: ABM10W-16.0000MHZ-4-D1X-T3; PARAM: 10PPM, -40~85oC; PRICE: 0.8$; VALUE: 16MHz
footprint XTL_4_2520 (CRYSTAL OSCILATOR 2.5X2.0mm, ABM10)
pins: 1, 2, 3 2, 4

## XTL_4_24MHz_2016
designator X?, comment 24MHz
Crystal 24MHz; MANF_P#: CN4024M00008001; PARAM2: 30PPM, 8pF; PARAM: -30~85oC; MANF: -; PRICE: 0.5$; VALUE: 24MHz
footprint XTL_4_2016 (ABM11)
pins: 1, 2, 3 2, 4

## XTL_4_24MHz_3225
designator X?, comment 24MHz
Crystal 24MHz; MANF: EPSON; MANF_P#: TSX-3225 24.0000MF10Z-C3; PARAM2: 10PPM, 18pF; PARAM: -20~75oC; PRICE: 0.5$; VALUE: 24MHz
footprint XTL_4_3225 (CRYSTAL OSCILATOR 3.2X2.5mm)
pins: 1, 2, 3 2, 4

## XTL_4_24MHz_3225A
designator X?, comment 24MHz
Crystal 24MHz; MANF: ABRACON; MANF_P#: ABM8W-24.0000MHZ-4-D1X-T3; PARAM2: 10PPM, 4pF; PARAM: -40~85oC; PRICE: 0.7$; VALUE: 24MHz
footprint XTL_4_3225 (CRYSTAL OSCILATOR 3.2X2.5mm)
pins: 1, 2, 3 2, 4

## XTL_4_25MHz_3225
designator X?, comment XTL_25MHz
CRYSTAL 25.00 MHZ 18pF, 10PPM; MANF: EPSON; DESC: DESCRIPTION; DIST#: MOUSER; PARAM2: PARAM; MANF_P#: TSX-3225 25.0000MF10P-C3; ASSEMBLY: ASSEMBLY; PARAM: 10PPM; PRICE: 0.5$; VALUE: XTL_25MHz
footprint XTL_4_3225 (CRYSTAL OSCILATOR 3.2X2.5mm)
pins: 1, 2, 3 2, 4

## XTL_4_25MHZ_3225A
designator X?, comment XTL_25MHz
CRYSTAL 25.00 MHZ 18pF, 50PPM; MANF: ABRACON; DESC: DESCRIPTION; DIST#: MOUSER; MANF_P#: ABM8-25.000MHZ-B2-T; PARAM2: 0.5$; ASSEMBLY: ASSEMBLY; PARAM: 50PPM; PRICE: PRICE; VALUE: XTL_25MHz
footprint XTL_4_3225 (CRYSTAL OSCILATOR 3.2X2.5mm)
pins: 1, 2, 3 2, 4

## XTL_4_25MHZ_3225A_2
designator X?, comment XTL_25MHz
CRYSTAL 25.00 MHZ 4pF, 10PPM; MANF: ABRACON; PARAM: 10PPM, 4pF, -40~85oC; DESC: DESCRIPTION; DIST#: MOUSER; MANF_P#: ABM8W-25.0000MHZ-4-D1X-T3; PARAM2: 0.6$; ASSEMBLY: ASSEMBLY; PRICE: PRICE; VALUE: XTL_25MHz
footprint XTL_4_3225 (CRYSTAL OSCILATOR 3.2X2.5mm)
pins: 1, 2, 3 2, 4

## XTL_4_26MHz_2016
designator X?, comment 26MHz
Crystal 26MHz; MANF: MURATA; MANF_P#: XRCGB26M000F1H00R0; PARAM2: 10ppm; PARAM: 6pF; PRICE: 1= 0.5$; VALUE: 26MHz
footprint XTL_4_2016
pins: 1, 2, 3 2, 4

## XTL_4_30MHz_2016
designator X?, comment 30MHz
Crystal 30MHz; MANF: MURATA; MANF_P#: XRCGB30M000F2P00R0; PARAM2: 30ppm; PARAM: 8pF; PRICE: 1= 0.6$; VALUE: 30MHz
footprint XTL_4_2016
pins: 1, 2, 3 2, 4

## XTL_4_30MHz_3225A
designator X?, comment 30MHz
Crystal 30MHz; MANF: ABRACON; MANF_P#: ABM8W-30.0000MHZ-6-D1X-T3; PARAM2: 10ppm; PARAM: 6pF; PRICE: 1= 0.66$; VALUE: 30MHz
footprint XTL_4_3225GEN (Footprint not found)
pins: 1, 2, 3 2, 4

## XTL_4_32MHz_2016
designator X?, comment 32MHz
Crystal 32MHz; MANF: MURATA; MANF_P#: XRCGB32M000FBH50R0; PARAM2: 10ppm; PARAM: 6pF; PRICE: 1= 0.3$; VALUE: 32MHz
footprint XTL_4_2016
pins: 1, 2, 3 2, 4

## XTL_4_40MHz_2016F
designator X?, comment XTL_40MHz
CRYSTAL 40.00 MHZ 7pF, 10PPM; MANF: DIODES; PARAM: 10PPM, -30~85oC; DESC: X1E000021036701; DIST#: MOUSER; PARAM2: 7pF, 40OhmESR; MANF_P#: FW400WFQA1; ASSEMBLY: ASSEMBLY; PRICE: 1$; VALUE: XTL_40MHz
footprint XTL_4_2016 (ABM11)
pins: 1, 2, 3 2, 4

## XTL_4_40MHz_2520F
designator X?, comment XTL_40MHz
CRYSTAL 40.00 MHZ 8pF, 10PPM; MANF: DIODES; PARAM: 10PPM, -30~85oC; DESC: X1E000021036701; DIST#: MOUSER; PARAM2: 8pF, 30OhmESR; MANF_P#: FH4000074Z; ASSEMBLY: ASSEMBLY; PRICE: 1$; VALUE: XTL_40MHz
footprint XTL_4_2520 (CRYSTAL OSCILATOR 2.5X2.0mm, ABM10)
pins: 1, 2, 3 2, 4

## XTL_4_40MHz_3225A
designator X?, comment XTL_40MHz
CRYSTAL 40.00 MHZ 4pF, 10PPM; MANF: ABRACON; PARAM: 10PPM, -20~70oC; DESC: X1E000021036701; DIST#: MOUSER; PARAM2: 4pF, 40OhmESR; MANF_P#: ABM8W-40.0000MHZ-4-B1U-T3; ASSEMBLY: ASSEMBLY; PRICE: 0.6$; VALUE: XTL_40MHz
footprint XTL_4_3225 (CRYSTAL OSCILATOR 3.2X2.5mm)
pins: 1, 2, 3 2, 4

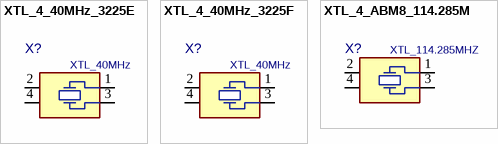
[diagram p3: symbols XTL_4_40MHz_3225E to XTL_4_ABM8_114.285M]

## XTL_4_40MHz_3225E
designator X?, comment XTL_40MHz
CRYSTAL 40.00 MHZ 7pF, 10PPM; MANF: EPSON; PARAM: 10PPM, -30~85oC; DESC: X1E000021036701; DIST#: MOUSER; PARAM2: 7pF, 40OhmESR; MANF_P#: TSX-3225 40.0000MF10Y-N6, TSX-3225 40.0000MF10Y-T6, TSX-3225 40.0000MF10Y-K6; ASSEMBLY: ASSEMBLY; PRICE: 0.34$; VALUE: XTL_40MHz
footprint XTL_4_3225 (CRYSTAL OSCILATOR 3.2X2.5mm)
pins: 1, 2, 3 2, 4

## XTL_4_40MHz_3225F
designator X?, comment XTL_40MHz
CRYSTAL 40.00 MHZ 7pF, 10PPM; MANF: DIODES; PARAM: 10PPM, -30~85oC; DESC: X1E000021036701; DIST#: MOUSER; PARAM2: 7pF, 40OhmESR; MANF_P#: FL400WFQA1; ASSEMBLY: ASSEMBLY; PRICE: 0.7$; VALUE: XTL_40MHz
footprint XTL_4_3225GEN (Footprint not found)
pins: 1, 2, 3 2, 4

## XTL_4_ABM8_114.285M
designator X?, comment XTL_114.285MHZ
CRYSTAL 114.285 MHZ 18PF SMD; MANF: ABRACON; DESC: DESCRIPTION; DIST#: MOUSER; PARAM2: PARAM; PARAM: 20PPM; MANF_P#: ABM8-166-114.285MHZ-T; ASSEMBLY: ASSEMBLY; PRICE: PRICE; VALUE: XTL_114.285MHZ
footprint XTL_4_3225 (CRYSTAL OSCILATOR 3.2X2.5mm)
pins: 1, 2, 3 2, 4